# Altium schematic symbol library 2020-05-02_11-58-54.SchLib: 2 symbols
Pins are listed as number, name and electrical type; pins without a type are passive.

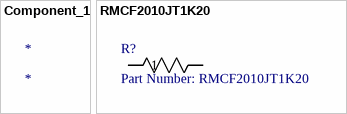
[diagram p0: symbols Component_1 to RMCF2010JT1K20]

## Component_1
designator *

## RMCF2010JT1K20
designator R?, comment Part Number: RMCF2010JT1K20
No Description Available; Vendor: Stackpole; Built_By: EMA_Cory; Manufacturer_Part_Number: RMCF2010JT1K20; Copyright: Copyright (C) 2018 Accelerated Designs. All rights reserved; RefDes: RefDes; Type: DEV; Value: Value
footprint RES_RMCF2010
pins: 1, 2